# Altium footprint library standard-case.PcbLib: 285 footprints (part 2 of 18)
Each footprint in its own frame and in the unit in brackets; x right, y up, seen from the top. Pads: shape width x height; smd on the part's side, far side on the other; paste and mask are expansions set on the pad; w line width, h text height; cw(c..) or ccw(c..) is an arc to the next point about the centre after c.
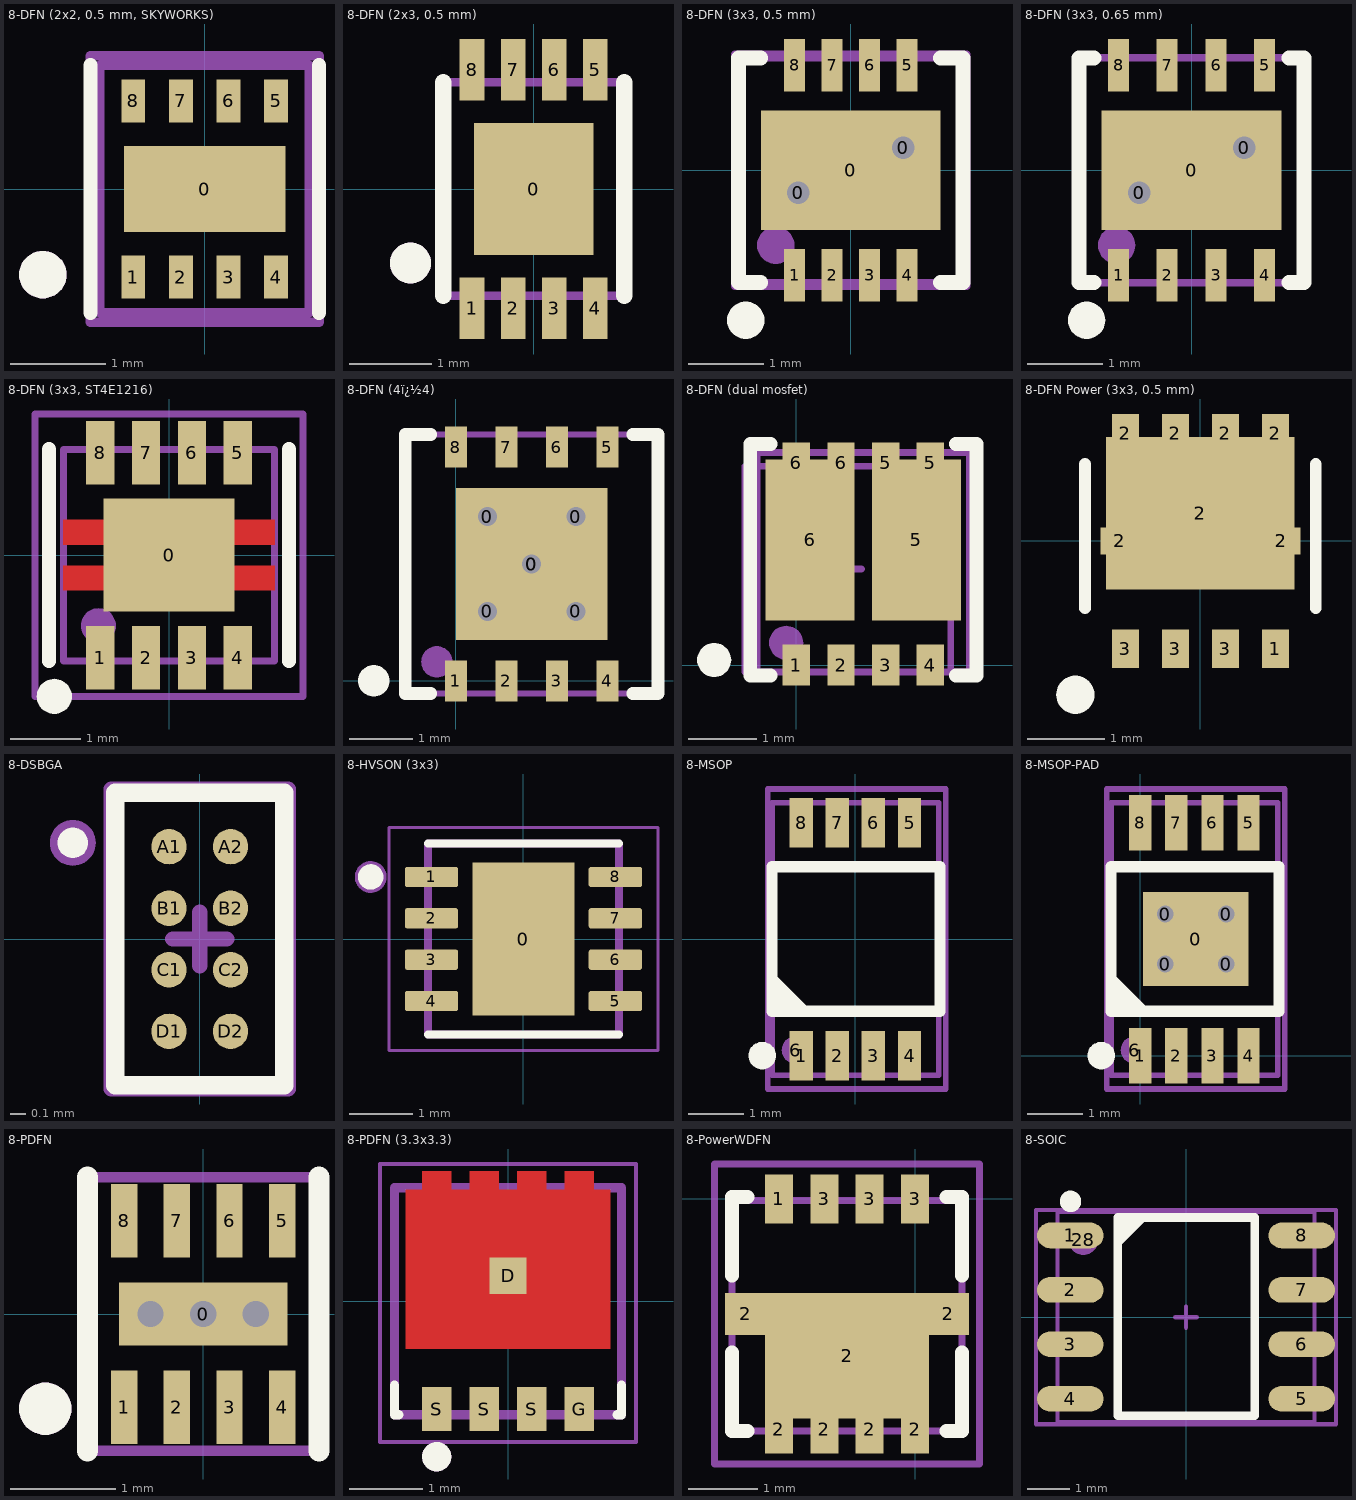
[diagram p1: the footprints below, top view; thin cyan lines are the x and y axes]

## 8-DFN (2x2, 0.5 mm, SKYWORKS) [mm] "2x2 mm, pitch 0.5 mm, power pad"
height 0.75
pads (11):
  rect 1.7x0.9 smd mask+0.05: 0(0,0)
  rect 0.25x0.45 smd mask+0.05: 1(-0.75,-0.925) 2(-0.25,-0.925) 3(0.25,-0.925) 4(0.75,-0.925) 5(0.75,0.925) 6(0.25,0.925) 7(-0.25,0.925) 8(-0.75,0.925)
  round 0.5 on Top Overlay mask+0.05: ""(-1.7,-0.9)
  round 0.5 on Mech13 mask+0.05: ""(-1.7,-0.9)
Top Overlay:
  lines w0.15: -1.2,-1.3 -1.2,1.3 ; 1.2,-1.3 1.2,1.3
Mechanical 13:
  lines w0.1: -1.1,-1.3 1.1,-1.3 1.1,1.3 -1.1,1.3 -1.1,-1.3
Mechanical 15:
  lines w0.1: -0.2,0 0.2,0 ; 0,-0.2 0,0.2 ; -1.2,-1.4 -1.2,1.4 1.2,1.4 1.2,-1.4 -1.2,-1.4
3D body "DFN2x2_8.STEP": height 0.85, standoff 0, extent -1,-1.01 1,1.01

## 8-DFN (2x3, 0.5 mm) [mm] "2x3 mm, pitch 0.5 mm, power pad"
height 0.75
pads (11):
  rect 1.45x1.6 smd mask+0.05: 0(0,0)
  rect 0.3x0.75 smd mask+0.05: 1(-0.75,-1.45) 2(-0.25,-1.45) 3(0.25,-1.45) 4(0.75,-1.45) 5(0.75,1.45) 6(0.25,1.45) 7(-0.25,1.45) 8(-0.75,1.45)
  round 0.5 on Mech1 mask+0.05: ""(-1.5,-0.9)
  round 0.5 on Top Overlay mask+0.05: ""(-1.5,-0.9)
Top Overlay:
  lines w0.2: -1.1,-1.3 -1.1,1.3 ; 1.1,-1.3 1.1,1.3
Mechanical 1:
  lines w0.1: -1.1,-1.3 1.1,-1.3 1.1,1.3 -1.1,1.3 -1.1,-1.3
Mechanical 15:
  lines w0.1: -0.2,0 0.2,0 ; 0,-0.2 0,0.2 ; -1.1,-1.3 -1.1,1.3 1.1,1.3 1.1,-1.3 -1.1,-1.3
3D body "DFN-8 2x3.step": height 1, standoff 0, extent -1,-1.525 1,1.525

## 8-DFN (3x3, 0.5 mm) [mm] "3x3 mm, pitch 0.5 mm, power pad"
height 0.75
pads (13):
  round 0.7 hole 0.3: 0(-0.7,-0.3) 0(0.7,0.3)
  rect 2.4x1.6 smd mask+0.05: 0(0,0)
  rect 0.28x0.7 smd mask+0.05: 1(-0.75,-1.4) 2(-0.25,-1.4) 3(0.25,-1.4) 4(0.75,-1.4) 5(0.75,1.4) 6(0.25,1.4) 7(-0.25,1.4) 8(-0.75,1.4)
  round 0.5 on Top Overlay mask+0.05: ""(-1.4,-2)
  round 0.5 on Mech1 mask+0.05: ""(-1,-1)
Top Overlay:
  lines w0.2: -1.2,-1.5 -1.5,-1.5 -1.5,1.5 -1.2,1.5 ; 1.2,-1.5 1.5,-1.5 1.5,1.5 1.2,1.5
Mechanical 1:
  lines w0.1: -1.55,-1.55 -1.55,1.55 1.55,1.55 1.55,-1.55 -1.55,-1.55
Mechanical 15:
  lines w0.1: -0.2,0 0.2,0 ; 0,-0.2 0,0.2 ; -1.5,-1.5 1.5,-1.5 1.5,1.5 -1.5,1.5 -1.5,-1.5
3D body "User Library-My-DFN-8-3x3-0_5.STEP": height 0.8, standoff 0, extent -1.55,-1.56 1.55,1.56

## 8-DFN (3x3, 0.65 mm) [mm] "3x3 mm, pitch 0.65 mm, power pad"
height 0.75
pads (13):
  round 0.7 hole 0.3: 0(-0.7,-0.3) 0(0.7,0.3)
  rect 2.4x1.6 smd mask+0.05: 0(0,0)
  rect 0.28x0.7 smd mask+0.05: 1(-0.975,-1.4) 2(-0.325,-1.4) 3(0.325,-1.4) 4(0.975,-1.4) 5(0.975,1.4) 6(0.325,1.4) 7(-0.325,1.4) 8(-0.975,1.4)
  round 0.5 on Top Overlay mask+0.05: ""(-1.4,-2)
  round 0.5 on Mech1 mask+0.05: ""(-1,-1)
Top Overlay:
  lines w0.2: -1.3,-1.5 -1.5,-1.5 -1.5,1.5 -1.3,1.5 ; 1.3,-1.5 1.5,-1.5 1.5,1.5 1.3,1.5
Mechanical 1:
  lines w0.1: -1.495,-1.5 -1.495,1.5 1.495,1.5 1.495,-1.5 -1.495,-1.5
Mechanical 15:
  lines w0.1: -0.2,0 0.2,0 ; 0,-0.2 0,0.2 ; -1.5,-1.5 -1.5,1.5 1.5,1.5 1.5,-1.5 -1.5,-1.5
3D body "User Library-DFN8N_65.STEP": height 0.9, standoff 0, extent -1.495,-1.5 1.495,1.5

## 8-DFN (3x3, ST4E1216) [mm] "3x3 mm ST4E1216"
height 0.75
pads (11):
  rect 1.85x1.6 smd mask+0.05: 0(0,0)
  rect 0.4x0.9 smd mask+0.05: 1(-0.975,-1.45) 2(-0.325,-1.45) 3(0.325,-1.45) 4(0.975,-1.45) 5(0.975,1.45) 6(0.325,1.45) 7(-0.325,1.45) 8(-0.975,1.45)
  round 0.5 on Top Overlay mask+0.05: ""(-1.625,-2)
  round 0.5 on Mech1 mask+0.05: ""(-1,-1)
Top Layer:
  region: -1.5,-0.5 -1.5,-0.15 -0.9,-0.15 -0.9,-0.5
  region: 1.5,-0.5 1.5,-0.15 0.9,-0.15 0.9,-0.5
  region: 1.5,0.5 1.5,0.15 0.9,0.15 0.9,0.5
  region: -1.5,0.5 -1.5,0.15 -0.9,0.15 -0.9,0.5
Top Overlay:
  lines w0.2: -1.7,-1.5 -1.7,1.5 ; 1.7,-1.5 1.7,1.5
Mechanical 1:
  lines w0.1: -1.495,-1.5 1.495,-1.5 1.495,1.5 -1.495,1.5 -1.495,-1.5
Mechanical 15:
  lines w0.1: -0.2,0 0.2,0 ; 0,-0.2 0,0.2 ; -1.9,-2 1.9,-2 1.9,2 -1.9,2 -1.9,-2
3D body "User Library-DFN8N_65.STEP": height 0.9, standoff 0, extent -1.495,-1.5 1.495,1.5

## 8-DFN (4ï¿½4) [mm] "4x4 mm, pitch 0.8 mm, power pad"
height 0.9
pads (16):
  round 0.7 hole 0.3: 0(0.5,1.1) 0(0.5,2.6) 0(1.2,1.85) 0(1.9,1.1) 0(1.9,2.6)
  rect 2.4x2.4 smd: 0(1.2,1.85)
  rect 0.35x0.65 smd: 1(0,0) 2(0.8,0) 3(1.6,0) 4(2.4,0) 5(2.4,3.7) 6(1.6,3.7) 7(0.8,3.7) 8(0,3.7)
  round 0.5 on Top Overlay: ""(-1.3,0)
  round 0.5 on Mech1: ""(-0.3,0.3)
Top Overlay:
  lines w0.2: -0.4,-0.2 -0.8,-0.2 -0.8,3.9 -0.4,3.9 ; 2.8,-0.2 3.2,-0.2 3.2,3.9 2.8,3.9
Mechanical 1:
  lines w0.1: -0.8,-0.2 3.2,-0.2 3.2,3.9 -0.8,3.9 -0.8,-0.2
Mechanical 15:
  lines w0.1: -0.8,-0.2 3.2,-0.2 3.2,3.9 -0.8,3.9 -0.8,-0.2
3D body "User Library-DFN8 Body 4x4 Pitch 0_8mm.STEP": height 0.97, standoff -0.03, extent -0.8,-0.2 3.2,3.9

## 8-DFN (dual mosfet) [mm] "3x3 mm, pitch 0.65 mm"
height 0.75
pads (12):
  rect 0.4x0.6 smd mask+0.05: 1(0,0) 2(0.65,0) 3(1.3,0) 4(1.95,0) 5(1.3,2.95) 5(1.95,2.95) 6(0,2.95) 6(0.65,2.95)
  rect 1.3x2.35 smd: 5(1.75,1.825) 6(0.2,1.825)
  round 0.5 on Top Overlay mask+0.05: ""(-1.2,0.075)
  round 0.5 on Mech1 mask+0.05: ""(-0.15,0.325)
Top Overlay:
  lines w0.2: -0.375,-0.15 -0.675,-0.15 -0.675,3.225 -0.375,3.225 ; 2.325,-0.15 2.625,-0.15 2.625,3.225 2.325,3.225
Mechanical 1:
  lines w0.1: -0.575,-0.1 2.525,-0.1 2.525,3.1 -0.575,3.1 -0.575,-0.1
Mechanical 15:
  lines w0.1: 0.55,1.4 0.95,1.4 ; 0.75,1.2 0.75,1.6 ; -0.75,-0.1 -0.75,2.9 2.25,2.9 2.25,-0.1 -0.75,-0.1
3D body "User Library-DFN8_3x3_0_65Pitch.STEP": height 0.8, standoff 0, extent -0.575,-0.1 2.525,3.1

## 8-DFN Power (3x3, 0.5 mm) [mm] "3x3 mm, pitch 0.5 mm, power pad"
height 0.75
pads (12):
  rect 0.35x0.5 smd: 1(0.975,-1.4) 2(-0.975,1.4) 2(-0.325,1.4) 2(0.325,1.4) 2(0.975,1.4) 3(-0.975,-1.4) 3(-0.325,-1.4) 3(0.325,-1.4)
  rect 0.5x0.35 smd: 2(-1.05,0) 2(1.05,0)
  rect 2.45x1.98 smd: 2(0,0.36)
  round 0.5 on Top Overlay mask+0.05: ""(-1.625,-2)
Top Overlay:
  lines w0.152: -1.5,-0.875 -1.5,1 ; 1.5,-0.875 1.5,1
3D body "AON7524.STEP": height 0.9, standoff 0, extent -1.55,-1.6 1.55,1.6
3D body "User Library-DFN8_3x3_0_65Pitch.STEP": height 0.8, standoff 0, extent -1.55,-1.6 1.55,1.6

## 8-DSBGA [mm] "1.783 x 0.983 mm, pitch 0.4 mm"
height 1.1
pads (10):
  round 0.23 smd mask+0.05: A1(-0.2,0.6) A2(0.2,0.6) B1(-0.2,0.2) B2(0.2,0.2) C1(-0.2,-0.2) C2(0.2,-0.2) D1(-0.2,-0.6) D2(0.2,-0.6)
  round 0.3 on Mech1: ""(-0.825,0.625)
  round 0.2 on Top Overlay mask+0.05: ""(-0.825,0.625)
Top Overlay:
  lines w0.12: -0.55,-0.95 0.55,-0.95 0.55,0.95 -0.55,0.95 -0.55,-0.95
Mechanical 1:
  lines w0.1: -0.55,-0.95 -0.55,0.95 0.55,0.95 0.55,-0.95 -0.55,-0.95
Mechanical 15:
  lines w0.1: -0.175,0 0.175,0 ; 0,-0.175 0,0.175 ; -0.575,-0.975 -0.575,0.975 0.575,0.975 0.575,-0.975 -0.575,-0.975
3D body "DSBGA-8.STEP": height 0.51, standoff 0.01, extent -0.492,-0.891 0.492,0.891

## 8-HVSON (3x3) [mm] "3x3 mm, pitch 0.65 mm, power pad"
height 0.8
pads (9):
  rect 1.6x2.4 smd paste-2: 0(0,0)
  rrect25% 0.84x0.32 smd: 1(-1.445,0.975) 2(-1.445,0.325) 3(-1.445,-0.325) 4(-1.445,-0.975) 5(1.445,-0.975) 6(1.445,-0.325) 7(1.445,0.325) 8(1.445,0.975)
Top Overlay:
  circle w0.2: c-2.4,0.975 r0.1
  lines w0.127: -1.5,-1.5 1.5,-1.5 ; -1.5,1.5 1.5,1.5
Top Paste:
  region: 0.413,-0.633 -0.427,-0.633 -0.427,0.613 0.413,0.613
Mechanical 13:
  circle w0.1: c-2.4,0.975 r0.2
  lines w0.127: -1.5,-1.5 -1.5,1.5 1.5,1.5 1.5,-1.5 -1.5,-1.5
Mechanical 15:
  lines w0.05: -2.115,-1.75 -2.115,1.75 2.115,1.75 2.115,-1.75 -2.115,-1.75
3D body "TJA1051TK_3,118.STEP": height 1, standoff 0, extent -1.5,-1.5 1.5,1.5

## 8-MSOP [mm] "pitch 0.65 mm"
pads (10):
  rect 0.42x0.89 smd: 1(-0.975,-2.1) 2(-0.325,-2.1) 3(0.325,-2.1) 4(0.975,-2.1) 5(0.975,2.09) 6(0.325,2.09) 7(-0.325,2.09) 8(-0.975,2.09)
  round 0.5 on Mech1: 6(-1.075,-2)
  round 0.5 on Top Overlay: ""(-1.675,-2.1)
Top Overlay:
  region: -1.5,-1.3 -0.78,-1.3 -1.5,-0.58
  lines w0.2: -1.5,-1.3 1.525,-1.3 1.525,1.3 -1.5,1.3 -1.5,-1.3
Mechanical 1:
  lines w0.1: -1.5,-2.45 -1.5,2.45 1.5,2.45 1.5,-2.45 -1.5,-2.45
Mechanical 15:
  lines w0.1: -1.575,-2.7 1.625,-2.7 1.625,1.2 1.625,2.7 -1.575,2.7 -1.575,-2.7
3D body "User Library-msop-8.STEP": height 1.15, standoff 0, extent -1.5,-2.45 1.5,2.45

## 8-MSOP-PAD [mm] "pitch 0.65 mm, power pad"
pads (15):
  round 0.7 hole 0.3: 0(0.45,1.65) 0(0.45,2.55) 0(1.55,1.65) 0(1.55,2.55)
  rect 1.9x1.7 smd: 0(1,2.1)
  rect 0.4x1 smd: 1(0,0) 2(0.65,0) 3(1.3,0) 4(1.95,0) 5(1.95,4.19) 6(1.3,4.19) 7(0.65,4.19) 8(0,4.19)
  round 0.5 on Mech1: 6(-0.1,0.1)
  round 0.5 on Top Overlay: ""(-0.7,0)
Top Overlay:
  region: -0.525,0.8 0.195,0.8 -0.525,1.52
  lines w0.2: -0.525,0.8 2.5,0.8 2.5,3.4 -0.525,3.4 -0.525,0.8
Mechanical 1:
  lines w0.1: -0.525,-0.35 -0.525,4.55 2.475,4.55 2.475,-0.35 -0.525,-0.35
Mechanical 15:
  lines w0.1: -0.6,-0.6 2.6,-0.6 2.6,3.3 2.6,4.8 -0.6,4.8 -0.6,-0.6
3D body "User Library-msop-8.STEP": height 1.15, standoff 0, extent -0.525,-0.35 2.475,4.55

## 8-PDFN [mm] "2x2 mm, pitch 0.5 mm, power pad"
height 0.75
pads (11):
  rect 1.6x0.6 smd mask+0.05: 0(0,0)
  rect 0.25x0.7 smd mask+0.05: 1(-0.75,-0.885) 2(-0.25,-0.885) 3(0.25,-0.885) 4(0.75,-0.885) 5(0.75,0.885) 6(0.25,0.885) 7(-0.25,0.885) 8(-0.75,0.885)
  round 0.5 on Mech1 mask+0.05: ""(-1.5,-0.9)
  round 0.5 on Top Overlay mask+0.05: ""(-1.5,-0.9)
via 0,0 diameter 0.5 hole 0.25
via 0.5,0 diameter 0.5 hole 0.25
via -0.5,0 diameter 0.5 hole 0.25
Top Overlay:
  lines w0.2: -1.1,-1.3 -1.1,1.3 ; 1.1,-1.3 1.1,1.3
Mechanical 1:
  lines w0.1: -1.1,-1.3 -1.1,1.3 1.1,1.3 1.1,-1.3 -1.1,-1.3
Mechanical 15:
  lines w0.1: -0.2,0 0.2,0 ; 0,-0.2 0,0.2 ; -1.1,-1.3 1.1,-1.3 1.1,1.3 -1.1,1.3 -1.1,-1.3
3D body "DFN2x2_8.STEP": height 0.85, standoff 0, extent -1,-1.01 1,1.01

## 8-PDFN (3.3x3.3) [mm]
height 1.1
pads (5):
  rect 0.5x0.5 smd paste-1 mask+0: D(0,0.35)
  rect 0.4x0.6 smd: G(0.975,-1.475) S(-0.975,-1.475) S(-0.325,-1.475) S(0.325,-1.475)
Top Layer:
  region: -1.175,1.525 -1.175,1.775 -0.775,1.775 -0.775,1.525 -0.525,1.525 -0.525,1.775 -0.125,1.775 -0.125,1.525 0.125,1.525 0.125,1.775 0.525,1.775 0.525,1.525 0.775,1.525 0.775,1.775 1.175,1.775 1.175,1.525 1.4,1.525 1.4,-0.65 -1.4,-0.65 -1.4,1.525
Top Overlay:
  circle w0.2: c-0.975,-2.125 r0.1
  lines w0.127: -1.55,-1.15 -1.55,-1.55 -1.495,-1.55 ; 1.495,-1.55 1.55,-1.55 1.55,-1.15
Top Paste:
  region: 1.175,1.775 1.175,1.525 0.775,1.525 0.775,1.775
  region: 0.525,1.775 0.525,1.525 0.125,1.525 0.125,1.775
  region: -0.125,1.775 -0.125,1.525 -0.525,1.525 -0.525,1.775
  region: -0.775,1.775 -0.775,1.525 -1.175,1.525 -1.175,1.775
  region: 1.085,1.215 1.085,0.505 0.155,0.505 0.155,1.215
  region: 1.085,0.195 1.085,-0.515 0.155,-0.515 0.155,0.195
  region: -0.155,0.195 -0.155,-0.515 -1.085,-0.515 -1.085,0.195
  region: -0.155,1.215 -0.155,0.505 -1.085,0.505 -1.085,1.215
Top Solder:
  region: -1.2,1.575 -1.2,1.825 -0.75,1.825 -0.75,1.575 -0.55,1.575 -0.55,1.825 -0.1,1.825 -0.1,1.575 0.1,1.575 0.1,1.825 0.55,1.825 0.55,1.575 0.75,1.575 0.75,1.825 1.2,1.825 1.2,1.575 1.45,1.575 1.45,-0.7 -1.45,-0.7 -1.45,1.575
Mechanical 13:
  circle w0.2: c-0.975,-2.125 r0.1
  lines w0.127: -1.55,-1.55 -1.55,1.55 1.55,1.55 1.55,-1.55 -1.55,-1.55
Mechanical 15:
  lines w0.05: -1.75,-1.925 -1.75,1.875 1.75,1.875 1.75,-1.925 -1.75,-1.925
3D body "TSM150P03PQ33 RGG--3DModel-STEP-269445.STEP": height 0.8, standoff 0, extent -1.65,-1.675 1.65,1.675

## 8-PowerWDFN [mm]
pads (11):
  rect 0.4x0.7 smd: 1(-1.95,0) 2(-1.95,-3.3) 2(-1.3,-3.3) 2(-0.65,-3.3) 2(0,-3.3) 3(-1.3,0) 3(-0.65,0) 3(0,0)
  rect 0.6x0.6 smd: 2(-2.425,-1.65) 2(0.475,-1.65)
  rect 2.35x1.8 smd: 2(-0.975,-2.25)
Top Overlay:
  lines w0.2: -2.625,-2.2 -2.625,-3.325 -2.4,-3.325 ; -2.625,-1.1 -2.625,0.025 -2.4,0.025 ; 0.45,-3.325 0.675,-3.325 0.675,-2.2 ; 0.45,0.025 0.675,0.025 0.675,-1.1
Mechanical 1:
  lines w0.1: -2.625,-3.325 -2.625,-0.025 0.675,-0.025 0.675,-3.325 -2.625,-3.325
Mechanical 15:
  lines w0.1: -2.875,-3.8 0.925,-3.8 0.925,0.5 -2.875,0.5 -2.875,-3.8
3D body "WDFN8.STEP": height 0.7, standoff -0.01, extent -2.625,-3.325 0.675,-0.025

## 8-SOIC [mm] "pitch 1.27 mm"
pads (9):
  rrect100% 1.55x0.6 smd: 1(-2.7,1.905) 2(-2.7,0.635) 3(-2.7,-0.635) 4(-2.7,-1.905) 5(2.7,-1.905) 6(2.7,-0.635) 7(2.7,0.635) 8(2.7,1.905)
  round 0.7 on Mech1: 28(-2.395,1.8)
Top Overlay:
  circle w0.25: c-2.695,2.7 r0.125
  region: -1.595,2.325 -1.595,1.605 -0.875,2.325
  lines w0.2: -1.595,-2.3 1.605,-2.3 1.605,2.325 -1.595,2.325 -1.595,-2.3
Mechanical 1:
  lines w0.1: -3,-2.45 -3,2.45 3,2.45 3,-2.45 -3,-2.45
Mechanical 15:
  lines w0.1: -0.25,0 0.25,0 ; 0,-0.25 0,0.25 ; -3.5,-2.5 -3.5,2.5 3.5,2.5 3.5,-2.5 -3.5,-2.5
3D body "User Library-SOIC-8-1.STEP": height 1.75, standoff 0, extent -3,-2.45 3,2.45